# Altium footprint library WR-BHD.PcbLib: 220 footprints (part 12 of 14)
Each footprint in its own frame and in the unit in brackets; x right, y up, seen from the top. Pads: shape width x height; smd on the part's side, far side on the other; paste and mask are expansions set on the pad; w line width, h text height; cw(c..) or ccw(c..) is an arc to the next point about the centre after c.
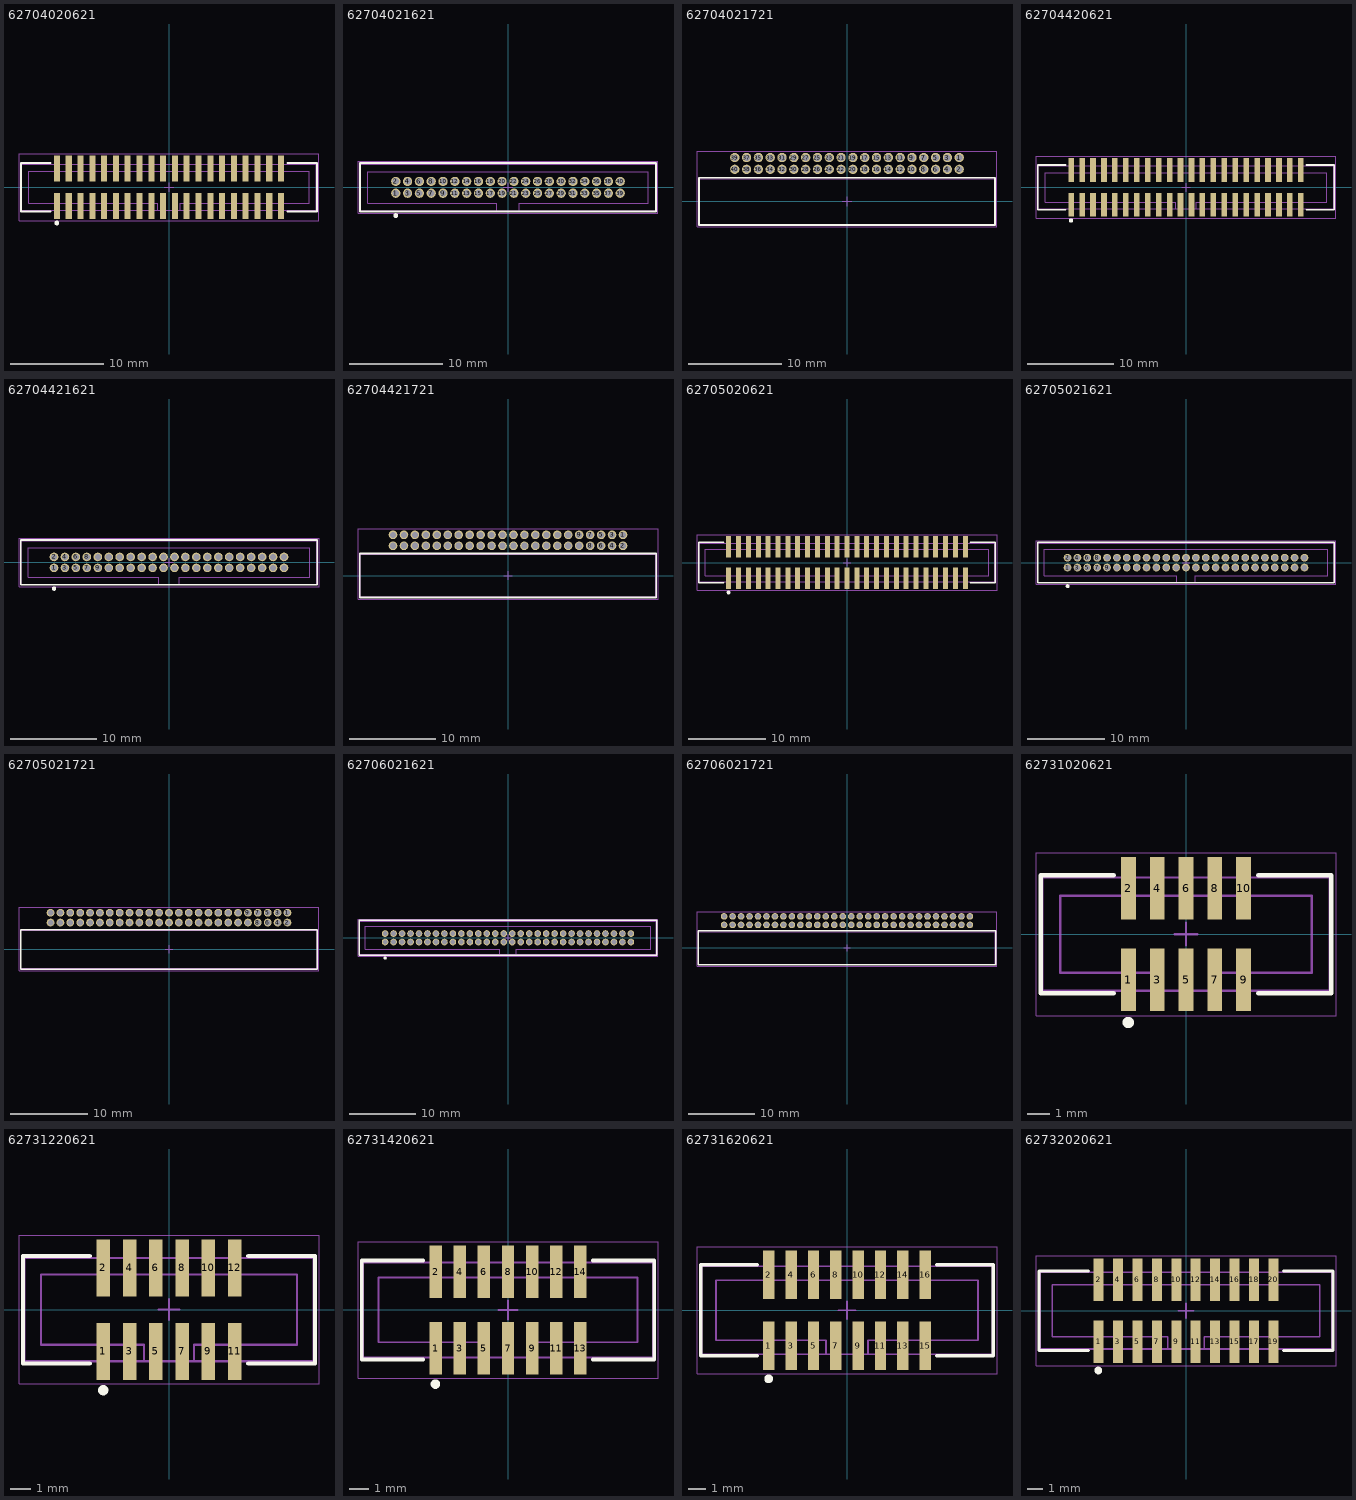
[diagram p11: the footprints below, top view; thin cyan lines are the x and y axes]

## 62704020621 [mm] "Boc Header SMT type, 40p"
height 5.3
pads (40):
  rect 0.65x2.76 smd: 1(-12.065,-2.02) 2(-12.065,2.02) 3(-10.795,-2.02) 4(-10.795,2.02) 5(-9.525,-2.02) 6(-9.525,2.02) 7(-8.255,-2.02) 8(-8.255,2.02) 9(-6.985,-2.02) 10(-6.985,2.02) 11(-5.715,-2.02) 12(-5.715,2.02) 13(-4.445,-2.02) 14(-4.445,2.02) 15(-3.175,-2.02) 16(-3.175,2.02) 17(-1.905,-2.02) 18(-1.905,2.02) 19(-0.635,-2.02) 20(-0.635,2.02) 21(0.635,-2.02) 22(0.635,2.02) 23(1.905,-2.02) 24(1.905,2.02) 25(3.175,-2.02) 26(3.175,2.02) 27(4.445,-2.02) 28(4.445,2.02) 29(5.715,-2.02) 30(5.715,2.02) 31(6.985,-2.02) 32(6.985,2.02) 33(8.255,-2.02) 34(8.255,2.02) 35(9.525,-2.02) 36(9.525,2.02) 37(10.795,-2.02) 38(10.795,2.02) 39(12.065,-2.02) 40(12.065,2.02)
Top Overlay:
  circle w0.25: c-12.075,-3.85 r0.125
  lines w0.2: -12.725,-2.6 -15.95,-2.6 -15.95,2.6 -12.725,2.6 ; 12.725,-2.6 15.95,-2.6 15.95,2.6 12.725,2.6
Top Assembly:
  lines w0.1: -1.2,-2.5 -1.2,-1.7 -15.075,-1.7 -15.075,1.7 15.075,1.7 15.075,-1.7 1.2,-1.7 1.2,-2.5 ; -15.875,-2.5 15.875,-2.5 15.875,2.5 -15.875,2.5 -15.875,-2.5
Top Designator:
  text ".Designator" at -3.647,-0.357 h1
Top 3D Body:
  lines w0.1: -1.2,-2.5 -1.2,-1.7 -15.075,-1.7 -15.075,1.7 15.075,1.7 15.075,-1.7 1.2,-1.7 1.2,-2.5 ; -15.875,-2.5 -15.875,2.5 15.875,2.5 15.875,-2.5 -15.875,-2.5
Top Courtyard:
  lines w0.05: -16.15,-3.6 16.15,-3.6 16.15,3.6 -16.15,3.6 -16.15,-3.6
Top Component Center:
  lines w0.1: -0.5,0 0.5,0 ; 0,-0.5 0,0.5
3D body "62704020621.stp": height 5.2, standoff 0, extent -15.875,-2.8 15.875,2.8

## 62704021621 [mm] "1.27x1.27mm Pitch Box Header Straight Type, 40p"
height 4.9
pads (40):
  round 1 hole 0.7: 1(-12.065,-0.635) 2(-12.065,0.635) 3(-10.795,-0.635) 4(-10.795,0.635) 5(-9.525,-0.635) 6(-9.525,0.635) 7(-8.255,-0.635) 8(-8.255,0.635) 9(-6.985,-0.635) 10(-6.985,0.635) 11(-5.715,-0.635) 12(-5.715,0.635) 13(-4.445,-0.635) 14(-4.445,0.635) 15(-3.175,-0.635) 16(-3.175,0.635) 17(-1.905,-0.635) 18(-1.905,0.635) 19(-0.635,-0.635) 20(-0.635,0.635) 21(0.635,-0.635) 22(0.635,0.635) 23(1.905,-0.635) 24(1.905,0.635) 25(3.175,-0.635) 26(3.175,0.635) 27(4.445,-0.635) 28(4.445,0.635) 29(5.715,-0.635) 30(5.715,0.635) 31(6.985,-0.635) 32(6.985,0.635) 33(8.255,-0.635) 34(8.255,0.635) 35(9.525,-0.635) 36(9.525,0.635) 37(10.795,-0.635) 38(10.795,0.635) 39(12.065,-0.635) 40(12.065,0.635)
Top Overlay:
  circle w0.25: c-12.065,-3.035 r0.125
  lines w0.2: -15.925,-2.6 15.925,-2.6 15.925,2.6 -15.925,2.6 -15.925,-2.6
Top Assembly:
  lines w0.1: -1.2,-2.499 -1.2,-1.699 ; -1.2,-1.7 -15.075,-1.7 -15.075,1.7 15.075,1.7 15.075,-1.7 1.2,-1.7 ; 1.2,-2.499 1.2,-1.699 ; -15.875,-2.5 15.875,-2.5 15.875,2.5 -15.875,2.5 -15.875,-2.5
Top Designator:
  text ".Designator" at -3.647,-0.357 h1
Top 3D Body:
  lines w0.1: -1.2,-2.499 -1.2,-1.699 ; -1.2,-1.7 -15.075,-1.7 -15.075,1.7 15.075,1.7 15.075,-1.7 1.2,-1.7 ; 1.2,-2.499 1.2,-1.699 ; -15.875,-2.5 -15.875,2.5 15.875,2.5 15.875,-2.5 -15.875,-2.5
Top Courtyard:
  lines w0.05: -16.125,-2.8 16.125,-2.8 16.125,2.8 -16.125,2.8 -16.125,-2.8
Top Component Center:
  lines w0.1: -0.5,0 0.5,0 ; 0,-0.5 0,0.5
3D body "62704021621.stp": height 4.93, standoff -2.37, extent -15.875,-2.55 15.875,2.5

## 62704021721 [mm] "1.27x1.27mm Pitch Box Header Right Angle Type, 40p"
height 5
pads (40):
  round 1 hole 0.7: 1(12.065,4.72) 2(12.065,3.45) 3(10.795,4.72) 4(10.795,3.45) 5(9.525,4.72) 6(9.525,3.45) 7(8.255,4.72) 8(8.255,3.45) 9(6.985,4.72) 10(6.985,3.45) 11(5.715,4.72) 12(5.715,3.45) 13(4.445,4.72) 14(4.445,3.45) 15(3.175,4.72) 16(3.175,3.45) 17(1.905,4.72) 18(1.905,3.45) 19(0.635,4.72) 20(0.635,3.45) 21(-0.635,4.72) 22(-0.635,3.45) 23(-1.905,4.72) 24(-1.905,3.45) 25(-3.175,4.72) 26(-3.175,3.45) 27(-4.445,4.72) 28(-4.445,3.45) 29(-5.715,4.72) 30(-5.715,3.45) 31(-6.985,4.72) 32(-6.985,3.45) 33(-8.255,4.72) 34(-8.255,3.45) 35(-9.525,4.72) 36(-9.525,3.45) 37(-10.795,4.72) 38(-10.795,3.45) 39(-12.065,4.72) 40(-12.065,3.45)
Top Overlay:
  lines w0.2: -15.925,-2.55 15.925,-2.55 15.925,2.55 -15.925,2.55 -15.925,-2.55
Top Assembly:
  lines w0.1: -15.875,-2.45 -15.875,2.45 15.875,2.45 15.875,-2.45 -15.875,-2.45
Top Designator:
  text ".Designator" at -3.647,-0.357 h1
Top 3D Body:
  lines w0.1: -15.875,-2.45 15.875,-2.45 15.875,2.45 -15.875,2.45 -15.875,-2.45
Top Courtyard:
  lines w0.05: -16.125,-2.75 16.125,-2.75 16.125,5.42 -16.125,5.42 -16.125,-2.75
Top Component Center:
  lines w0.1: -0.5,0 0.5,0 ; 0,-0.5 0,0.5
3D body "62704021721.stp": height 5.08, standoff -2.37, extent -15.875,-2.45 15.875,4.92

## 62704420621 [mm] "Boc Header SMT type, 44p"
height 5.3
pads (44):
  rect 0.65x2.76 smd: 1(-13.335,-2.02) 2(-13.335,2.02) 3(-12.065,-2.02) 4(-12.065,2.02) 5(-10.795,-2.02) 6(-10.795,2.02) 7(-9.525,-2.02) 8(-9.525,2.02) 9(-8.255,-2.02) 10(-8.255,2.02) 11(-6.985,-2.02) 12(-6.985,2.02) 13(-5.715,-2.02) 14(-5.715,2.02) 15(-4.445,-2.02) 16(-4.445,2.02) 17(-3.175,-2.02) 18(-3.175,2.02) 19(-1.905,-2.02) 20(-1.905,2.02) 21(-0.635,-2.02) 22(-0.635,2.02) 23(0.635,-2.02) 24(0.635,2.02) 25(1.905,-2.02) 26(1.905,2.02) 27(3.175,-2.02) 28(3.175,2.02) 29(4.445,-2.02) 30(4.445,2.02) 31(5.715,-2.02) 32(5.715,2.02) 33(6.985,-2.02) 34(6.985,2.02) 35(8.255,-2.02) 36(8.255,2.02) 37(9.525,-2.02) 38(9.525,2.02) 39(10.795,-2.02) 40(10.795,2.02) 41(12.065,-2.02) 42(12.065,2.02) 43(13.335,-2.02) 44(13.335,2.02)
Top Overlay:
  circle w0.25: c-13.345,-3.85 r0.125
  lines w0.2: -13.995,-2.6 -17.22,-2.6 -17.22,2.6 -13.995,2.6 ; 13.995,-2.6 17.22,-2.6 17.22,2.6 13.995,2.6
Top Assembly:
  lines w0.1: -1.2,-2.5 -1.2,-1.7 -16.345,-1.7 -16.345,1.7 16.345,1.7 16.345,-1.7 1.2,-1.7 1.2,-2.5 ; -17.145,-2.5 -17.145,2.5 17.145,2.5 17.145,-2.5 -17.145,-2.5
Top Designator:
  text ".Designator" at -3.647,-0.357 h1
Top 3D Body:
  lines w0.1: -1.2,-2.5 -1.2,-1.7 -16.345,-1.7 -16.345,1.7 16.345,1.7 16.345,-1.7 1.2,-1.7 1.2,-2.5 ; -17.145,-2.5 17.145,-2.5 17.145,2.5 -17.145,2.5 -17.145,-2.5
Top Courtyard:
  lines w0.05: -17.42,-3.6 -17.42,3.6 17.42,3.6 17.42,-3.6 -17.42,-3.6
Top Component Center:
  lines w0.1: -0.5,0 0.5,0 ; 0,-0.5 0,0.5
3D body "62704420621.stp": height 5.2, standoff 0, extent -17.145,-2.8 17.145,2.8

## 62704421621 [mm] "1.27x1.27mm Pitch Box Header Straight Type, 44p"
height 4.9
pads (44):
  round 1 hole 0.7: 1(-13.335,-0.635) 2(-13.335,0.635) 3(-12.065,-0.635) 4(-12.065,0.635) 5(-10.795,-0.635) 6(-10.795,0.635) 7(-9.525,-0.635) 8(-9.525,0.635) 9(-8.255,-0.635) 10(-8.255,0.635) 11(-6.985,-0.635) 12(-6.985,0.635) 13(-5.715,-0.635) 14(-5.715,0.635) 15(-4.445,-0.635) 16(-4.445,0.635) 17(-3.175,-0.635) 18(-3.175,0.635) 19(-1.905,-0.635) 20(-1.905,0.635) 21(-0.635,-0.635) 22(-0.635,0.635) 23(0.635,-0.635) 24(0.635,0.635) 25(1.905,-0.635) 26(1.905,0.635) 27(3.175,-0.635) 28(3.175,0.635) 29(4.445,-0.635) 30(4.445,0.635) 31(5.715,-0.635) 32(5.715,0.635) 33(6.985,-0.635) 34(6.985,0.635) 35(8.255,-0.635) 36(8.255,0.635) 37(9.525,-0.635) 38(9.525,0.635) 39(10.795,-0.635) 40(10.795,0.635) 41(12.065,-0.635) 42(12.065,0.635) 43(13.335,-0.635) 44(13.335,0.635)
Top Overlay:
  circle w0.25: c-13.335,-3.035 r0.125
  lines w0.2: -17.195,-2.6 17.195,-2.6 17.195,2.6 -17.195,2.6 -17.195,-2.6
Top Assembly:
  lines w0.1: -1.2,-2.499 -1.2,-1.699 ; -1.2,-1.7 -16.345,-1.7 -16.345,1.7 16.345,1.7 16.345,-1.7 1.2,-1.7 ; 1.2,-2.499 1.2,-1.699 ; -17.145,-2.5 17.145,-2.5 17.145,2.5 -17.145,2.5 -17.145,-2.5
Top Designator:
  text ".Designator" at -3.647,-0.357 h1
Top 3D Body:
  lines w0.1: -1.2,-2.499 -1.2,-1.699 ; -1.2,-1.7 -16.345,-1.7 -16.345,1.7 16.345,1.7 16.345,-1.7 1.2,-1.7 ; 1.2,-2.499 1.2,-1.699 ; -17.145,-2.5 -17.145,2.5 17.145,2.5 17.145,-2.5 -17.145,-2.5
Top Courtyard:
  lines w0.05: -17.395,-2.8 17.395,-2.8 17.395,2.8 -17.395,2.8 -17.395,-2.8
Top Component Center:
  lines w0.1: -0.5,0 0.5,0 ; 0,-0.5 0,0.5
3D body "62704421621.stp": height 4.93, standoff -2.37, extent -17.145,-2.55 17.145,2.5

## 62704421721 [mm] "1.27x1.27mm Pitch Box Header Right Angle Type, 44p"
height 5
pads (44):
  round 1 hole 0.7: 1(13.335,4.72) 2(13.335,3.45) 3(12.065,4.72) 4(12.065,3.45) 5(10.795,4.72) 6(10.795,3.45) 7(9.525,4.72) 8(9.525,3.45) 9(8.255,4.72) 10(8.255,3.45) 11(6.985,4.72) 12(6.985,3.45) 13(5.715,4.72) 14(5.715,3.45) 15(4.445,4.72) 16(4.445,3.45) 17(3.175,4.72) 18(3.175,3.45) 19(1.905,4.72) 20(1.905,3.45) 21(0.635,4.72) 22(0.635,3.45) 23(-0.635,4.72) 24(-0.635,3.45) 25(-1.905,4.72) 26(-1.905,3.45) 27(-3.175,4.72) 28(-3.175,3.45) 29(-4.445,4.72) 30(-4.445,3.45) 31(-5.715,4.72) 32(-5.715,3.45) 33(-6.985,4.72) 34(-6.985,3.45) 35(-8.255,4.72) 36(-8.255,3.45) 37(-9.525,4.72) 38(-9.525,3.45) 39(-10.795,4.72) 40(-10.795,3.45) 41(-12.065,4.72) 42(-12.065,3.45) 43(-13.335,4.72) 44(-13.335,3.45)
Top Overlay:
  lines w0.2: -17.195,-2.55 -17.195,2.55 17.195,2.55 17.195,-2.55 -17.195,-2.55
Top Assembly:
  lines w0.1: -17.145,-2.45 17.145,-2.45 17.145,2.45 -17.145,2.45 -17.145,-2.45
Top Designator:
  text ".Designator" at -3.647,-0.357 h1
Top 3D Body:
  lines w0.1: -17.145,-2.45 -17.145,2.45 17.145,2.45 17.145,-2.45 -17.145,-2.45
Top Courtyard:
  lines w0.05: -17.395,-2.75 -17.395,5.42 17.395,5.42 17.395,-2.75 -17.395,-2.75
Top Component Center:
  lines w0.1: -0.5,0 0.5,0 ; 0,-0.5 0,0.5
3D body "62704421721.stp": height 5.08, standoff -2.37, extent -17.145,-2.45 17.145,4.92

## 62705020621 [mm] "Boc Header SMT type, 50p"
height 5.3
pads (50):
  rect 0.65x2.76 smd: 1(-15.24,-2.02) 2(-15.24,2.02) 3(-13.97,-2.02) 4(-13.97,2.02) 5(-12.7,-2.02) 6(-12.7,2.02) 7(-11.43,-2.02) 8(-11.43,2.02) 9(-10.16,-2.02) 10(-10.16,2.02) 11(-8.89,-2.02) 12(-8.89,2.02) 13(-7.62,-2.02) 14(-7.62,2.02) 15(-6.35,-2.02) 16(-6.35,2.02) 17(-5.08,-2.02) 18(-5.08,2.02) 19(-3.81,-2.02) 20(-3.81,2.02) 21(-2.54,-2.02) 22(-2.54,2.02) 23(-1.27,-2.02) 24(-1.27,2.02) 25(0,-2.02) 26(0,2.02) 27(1.27,-2.02) 28(1.27,2.02) 29(2.54,-2.02) 30(2.54,2.02) 31(3.81,-2.02) 32(3.81,2.02) 33(5.08,-2.02) 34(5.08,2.02) 35(6.35,-2.02) 36(6.35,2.02) 37(7.62,-2.02) 38(7.62,2.02) 39(8.89,-2.02) 40(8.89,2.02) 41(10.16,-2.02) 42(10.16,2.02) 43(11.43,-2.02) 44(11.43,2.02) 45(12.7,-2.02) 46(12.7,2.02) 47(13.97,-2.02) 48(13.97,2.02) 49(15.24,-2.02) 50(15.24,2.02)
Top Overlay:
  circle w0.25: c-15.25,-3.85 r0.125
  lines w0.2: -15.9,-2.6 -19.125,-2.6 -19.125,2.6 -15.9,2.6 ; 15.9,-2.6 19.125,-2.6 19.125,2.6 15.9,2.6
Top Assembly:
  lines w0.1: -1.2,-2.5 -1.2,-1.7 -18.25,-1.7 -18.25,1.7 18.25,1.7 18.25,-1.7 1.2,-1.7 1.2,-2.5 ; -19.05,-2.5 -19.05,2.5 19.05,2.5 19.05,-2.5 -19.05,-2.5
Top Designator:
  text ".Designator" at -3.647,-0.357 h1
Top 3D Body:
  lines w0.1: -1.2,-2.5 -1.2,-1.7 -18.25,-1.7 -18.25,1.7 18.25,1.7 18.25,-1.7 1.2,-1.7 1.2,-2.5 ; -19.05,-2.5 19.05,-2.5 19.05,2.5 -19.05,2.5 -19.05,-2.5
Top Courtyard:
  lines w0.05: -19.325,-3.6 -19.325,3.6 19.325,3.6 19.325,-3.6 -19.325,-3.6
Top Component Center:
  lines w0.1: -0.5,0 0.5,0 ; 0,-0.5 0,0.5
3D body "62705020621.stp": height 5.2, standoff 0, extent -19.05,-2.8 19.05,2.8

## 62705021621 [mm] "1.27x1.27mm Pitch Box Header Straight Type, 50p"
height 4.9
pads (50):
  round 1 hole 0.7: 1(-15.24,-0.635) 2(-15.24,0.635) 3(-13.97,-0.635) 4(-13.97,0.635) 5(-12.7,-0.635) 6(-12.7,0.635) 7(-11.43,-0.635) 8(-11.43,0.635) 9(-10.16,-0.635) 10(-10.16,0.635) 11(-8.89,-0.635) 12(-8.89,0.635) 13(-7.62,-0.635) 14(-7.62,0.635) 15(-6.35,-0.635) 16(-6.35,0.635) 17(-5.08,-0.635) 18(-5.08,0.635) 19(-3.81,-0.635) 20(-3.81,0.635) 21(-2.54,-0.635) 22(-2.54,0.635) 23(-1.27,-0.635) 24(-1.27,0.635) 25(0,-0.635) 26(0,0.635) 27(1.27,-0.635) 28(1.27,0.635) 29(2.54,-0.635) 30(2.54,0.635) 31(3.81,-0.635) 32(3.81,0.635) 33(5.08,-0.635) 34(5.08,0.635) 35(6.35,-0.635) 36(6.35,0.635) 37(7.62,-0.635) 38(7.62,0.635) 39(8.89,-0.635) 40(8.89,0.635) 41(10.16,-0.635) 42(10.16,0.635) 43(11.43,-0.635) 44(11.43,0.635) 45(12.7,-0.635) 46(12.7,0.635) 47(13.97,-0.635) 48(13.97,0.635) 49(15.24,-0.635) 50(15.24,0.635)
Top Overlay:
  circle w0.25: c-15.24,-3.035 r0.125
  lines w0.2: -19.1,-2.6 19.1,-2.6 19.1,2.6 -19.1,2.6 -19.1,-2.6
Top Assembly:
  lines w0.1: -1.2,-2.499 -1.2,-1.699 ; -1.2,-1.7 -18.25,-1.7 -18.25,1.7 18.25,1.7 18.25,-1.7 1.2,-1.7 ; 1.2,-2.499 1.2,-1.699 ; -19.05,-2.5 19.05,-2.5 19.05,2.5 -19.05,2.5 -19.05,-2.5
Top Designator:
  text ".Designator" at -3.647,-0.357 h1
Top 3D Body:
  lines w0.1: -1.2,-2.499 -1.2,-1.699 ; -1.2,-1.7 -18.25,-1.7 -18.25,1.7 18.25,1.7 18.25,-1.7 1.2,-1.7 ; 1.2,-2.499 1.2,-1.699 ; -19.05,-2.5 -19.05,2.5 19.05,2.5 19.05,-2.5 -19.05,-2.5
Top Courtyard:
  lines w0.05: -19.3,-2.8 19.3,-2.8 19.3,2.8 -19.3,2.8 -19.3,-2.8
Top Component Center:
  lines w0.1: -0.5,0 0.5,0 ; 0,-0.5 0,0.5
3D body "62705021621.stp": height 4.93, standoff -2.37, extent -19.05,-2.55 19.05,2.5

## 62705021721 [mm] "1.27x1.27mm Pitch Box Header Right Angle Type, 50p"
height 5
pads (50):
  round 1 hole 0.7: 1(15.24,4.72) 2(15.24,3.45) 3(13.97,4.72) 4(13.97,3.45) 5(12.7,4.72) 6(12.7,3.45) 7(11.43,4.72) 8(11.43,3.45) 9(10.16,4.72) 10(10.16,3.45) 11(8.89,4.72) 12(8.89,3.45) 13(7.62,4.72) 14(7.62,3.45) 15(6.35,4.72) 16(6.35,3.45) 17(5.08,4.72) 18(5.08,3.45) 19(3.81,4.72) 20(3.81,3.45) 21(2.54,4.72) 22(2.54,3.45) 23(1.27,4.72) 24(1.27,3.45) 25(0,4.72) 26(0,3.45) 27(-1.27,4.72) 28(-1.27,3.45) 29(-2.54,4.72) 30(-2.54,3.45) 31(-3.81,4.72) 32(-3.81,3.45) 33(-5.08,4.72) 34(-5.08,3.45) 35(-6.35,4.72) 36(-6.35,3.45) 37(-7.62,4.72) 38(-7.62,3.45) 39(-8.89,4.72) 40(-8.89,3.45) 41(-10.16,4.72) 42(-10.16,3.45) 43(-11.43,4.72) 44(-11.43,3.45) 45(-12.7,4.72) 46(-12.7,3.45) 47(-13.97,4.72) 48(-13.97,3.45) 49(-15.24,4.72) 50(-15.24,3.45)
Top Overlay:
  lines w0.2: -19.1,-2.55 19.1,-2.55 19.1,2.55 -19.1,2.55 -19.1,-2.55
Top Assembly:
  lines w0.1: -19.05,-2.45 -19.05,2.45 19.05,2.45 19.05,-2.45 -19.05,-2.45
Top Designator:
  text ".Designator" at -3.647,-0.357 h1
Top 3D Body:
  lines w0.1: -19.05,-2.45 19.05,-2.45 19.05,2.45 -19.05,2.45 -19.05,-2.45
Top Courtyard:
  lines w0.05: -19.3,-2.75 19.3,-2.75 19.3,5.42 -19.3,5.42 -19.3,-2.75
Top Component Center:
  lines w0.1: -0.5,0 0.5,0 ; 0,-0.5 0,0.5
3D body "62705021721.stp": height 5.08, standoff -2.37, extent -19.05,-2.45 19.05,4.92

## 62706021621 [mm] "1.27x1.27mm Pitch Box Header Straight Type, 60p"
height 4.9
pads (60):
  round 1 hole 0.7: 1(-18.415,-0.635) 2(-18.415,0.635) 3(-17.145,-0.635) 4(-17.145,0.635) 5(-15.875,-0.635) 6(-15.875,0.635) 7(-14.605,-0.635) 8(-14.605,0.635) 9(-13.335,-0.635) 10(-13.335,0.635) 11(-12.065,-0.635) 12(-12.065,0.635) 13(-10.795,-0.635) 14(-10.795,0.635) 15(-9.525,-0.635) 16(-9.525,0.635) 17(-8.255,-0.635) 18(-8.255,0.635) 19(-6.985,-0.635) 20(-6.985,0.635) 21(-5.715,-0.635) 22(-5.715,0.635) 23(-4.445,-0.635) 24(-4.445,0.635) 25(-3.175,-0.635) 26(-3.175,0.635) 27(-1.905,-0.635) 28(-1.905,0.635) 29(-0.635,-0.635) 30(-0.635,0.635) 31(0.635,-0.635) 32(0.635,0.635) 33(1.905,-0.635) 34(1.905,0.635) 35(3.175,-0.635) 36(3.175,0.635) 37(4.445,-0.635) 38(4.445,0.635) 39(5.715,-0.635) 40(5.715,0.635) 41(6.985,-0.635) 42(6.985,0.635) 43(8.255,-0.635) 44(8.255,0.635) 45(9.525,-0.635) 46(9.525,0.635) 47(10.795,-0.635) 48(10.795,0.635) 49(12.065,-0.635) 50(12.065,0.635) 51(13.335,-0.635) 52(13.335,0.635) 53(14.605,-0.635) 54(14.605,0.635) 55(15.875,-0.635) 56(15.875,0.635) 57(17.145,-0.635) 58(17.145,0.635) 59(18.415,-0.635) 60(18.415,0.635)
Top Overlay:
  circle w0.25: c-18.415,-3.035 r0.125
  lines w0.2: -22.275,-2.6 -22.275,2.6 22.275,2.6 22.275,-2.6 -22.275,-2.6
Top Assembly:
  lines w0.1: -1.2,-2.499 -1.2,-1.699 ; -1.2,-1.7 -21.425,-1.7 -21.425,1.7 21.425,1.7 21.425,-1.7 1.2,-1.7 ; 1.2,-2.499 1.2,-1.699 ; -22.225,-2.5 -22.225,2.5 22.225,2.5 22.225,-2.5 -22.225,-2.5
Top Designator:
  text ".Designator" at -3.647,-0.357 h1
Top 3D Body:
  lines w0.1: -1.2,-2.524 -1.2,-1.724 ; -1.2,-1.7 -21.425,-1.7 -21.425,1.7 21.425,1.7 21.425,-1.7 1.2,-1.7 ; 1.2,-2.524 1.2,-1.724 ; -22.225,-2.5 22.225,-2.5 22.225,2.5 -22.225,2.5 -22.225,-2.5
Top Courtyard:
  lines w0.05: -22.475,-2.8 -22.475,2.8 22.475,2.8 22.475,-2.8 -22.475,-2.8
Top Component Center:
  lines w0.1: -0.5,0 0.5,0 ; 0,-0.5 0,0.5
3D body "62706021621.stp": height 4.93, standoff -2.37, extent -22.225,-2.525 22.225,2.525

## 62706021721 [mm] "1.27x1.27mm Pitch Box Header Right Angle Type, 60p"
height 5
pads (60):
  round 1 hole 0.7: 1(18.415,4.72) 2(18.415,3.45) 3(17.145,4.72) 4(17.145,3.45) 5(15.875,4.72) 6(15.875,3.45) 7(14.605,4.72) 8(14.605,3.45) 9(13.335,4.72) 10(13.335,3.45) 11(12.065,4.72) 12(12.065,3.45) 13(10.795,4.72) 14(10.795,3.45) 15(9.525,4.72) 16(9.525,3.45) 17(8.255,4.72) 18(8.255,3.45) 19(6.985,4.72) 20(6.985,3.45) 21(5.715,4.72) 22(5.715,3.45) 23(4.445,4.72) 24(4.445,3.45) 25(3.175,4.72) 26(3.175,3.45) 27(1.905,4.72) 28(1.905,3.45) 29(0.635,4.72) 30(0.635,3.45) 31(-0.635,4.72) 32(-0.635,3.45) 33(-1.905,4.72) 34(-1.905,3.45) 35(-3.175,4.72) 36(-3.175,3.45) 37(-4.445,4.72) 38(-4.445,3.45) 39(-5.715,4.72) 40(-5.715,3.45) 41(-6.985,4.72) 42(-6.985,3.45) 43(-8.255,4.72) 44(-8.255,3.45) 45(-9.525,4.72) 46(-9.525,3.45) 47(-10.795,4.72) 48(-10.795,3.45) 49(-12.065,4.72) 50(-12.065,3.45) 51(-13.335,4.72) 52(-13.335,3.45) 53(-14.605,4.72) 54(-14.605,3.45) 55(-15.875,4.72) 56(-15.875,3.45) 57(-17.145,4.72) 58(-17.145,3.45) 59(-18.415,4.72) 60(-18.415,3.45)
Top Overlay:
  lines w0.2: -22.275,-2.55 -22.275,2.55 22.275,2.55 22.275,-2.55 -22.275,-2.55
Top Assembly:
  lines w0.1: -22.225,-2.45 22.225,-2.45 22.225,2.45 -22.225,2.45 -22.225,-2.45
Top Designator:
  text ".Designator" at -3.647,-0.357 h1
Top 3D Body:
  lines w0.1: -22.225,-2.45 -22.225,2.45 22.225,2.45 22.225,-2.45 -22.225,-2.45
Top Courtyard:
  lines w0.05: -22.475,-2.75 -22.475,5.42 22.475,5.42 22.475,-2.75 -22.475,-2.75
Top Component Center:
  lines w0.1: -0.5,0 0.5,0 ; 0,-0.5 0,0.5
3D body "62706021721.stp": height 5.08, standoff -2.37, extent -22.225,-2.45 22.225,4.92

## 62731020621 [mm] "Boc Header SMT type, 10p"
height 5.3
pads (10):
  rect 0.65x2.76 smd: 1(-2.54,-2.02) 2(-2.54,2.02) 3(-1.27,-2.02) 4(-1.27,2.02) 5(0,-2.02) 6(0,2.02) 7(1.27,-2.02) 8(1.27,2.02) 9(2.54,-2.02) 10(2.54,2.02)
Top Overlay:
  circle w0.25: c-2.55,-3.9 r0.125
  lines w0.2: -3.2,-2.6 -6.425,-2.6 -6.425,2.6 -3.2,2.6 ; 3.2,-2.6 6.425,-2.6 6.425,2.6 3.2,2.6
Top Assembly:
  lines w0.1: -1.2,-2.5 -1.2,-1.7 -5.55,-1.7 -5.55,1.7 5.55,1.7 5.55,-1.7 1.2,-1.7 1.2,-2.5 ; -6.35,-2.5 6.35,-2.5 6.35,2.5 -6.35,2.5 -6.35,-2.5
Top Designator:
  text ".Designator" at -3.647,-0.357 h1
Top 3D Body:
  lines w0.1: -1.2,-2.5 -1.2,-1.7 -5.55,-1.7 -5.55,1.7 5.55,1.7 5.55,-1.7 1.2,-1.7 1.2,-2.5 ; -6.35,-2.5 -6.35,2.5 6.35,2.5 6.35,-2.5 -6.35,-2.5
Top Courtyard:
  lines w0.05: -6.625,-3.6 6.625,-3.6 6.625,3.6 -6.625,3.6 -6.625,-3.6
Top Component Center:
  lines w0.1: -0.5,0 0.5,0 ; 0,-0.5 0,0.5
3D body "62731020621.stp": height 5.3, standoff 0, extent -6.35,-2.755 6.35,2.755

## 62731220621 [mm] "Boc Header SMT type, 12p"
height 5.3
pads (12):
  rect 0.65x2.76 smd: 1(-3.175,-2.02) 2(-3.175,2.02) 3(-1.905,-2.02) 4(-1.905,2.02) 5(-0.635,-2.02) 6(-0.635,2.02) 7(0.635,-2.02) 8(0.635,2.02) 9(1.905,-2.02) 10(1.905,2.02) 11(3.175,-2.02) 12(3.175,2.02)
Top Overlay:
  circle w0.25: c-3.185,-3.9 r0.125
  lines w0.2: -3.835,-2.6 -7.06,-2.6 -7.06,2.6 -3.835,2.6 ; 3.835,-2.6 7.06,-2.6 7.06,2.6 3.835,2.6
Top Assembly:
  lines w0.1: -1.2,-2.5 -1.2,-1.7 -6.185,-1.7 -6.185,1.7 6.185,1.7 6.185,-1.7 1.2,-1.7 1.2,-2.5 ; -6.985,-2.5 6.985,-2.5 6.985,2.5 -6.985,2.5 -6.985,-2.5
Top Designator:
  text ".Designator" at -3.647,-0.357 h1
Top 3D Body:
  lines w0.1: -1.2,-2.5 -1.2,-1.7 -6.185,-1.7 -6.185,1.7 6.185,1.7 6.185,-1.7 1.2,-1.7 1.2,-2.5 ; -6.985,-2.5 -6.985,2.5 6.985,2.5 6.985,-2.5 -6.985,-2.5
Top Courtyard:
  lines w0.05: -7.26,-3.6 7.26,-3.6 7.26,3.6 -7.26,3.6 -7.26,-3.6
Top Component Center:
  lines w0.1: -0.5,0 0.5,0 ; 0,-0.5 0,0.5
3D body "62731220621.stp": height 5.3, standoff 0, extent -6.985,-2.755 6.985,2.755

## 62731420621 [mm] "Boc Header SMT type, 14p"
height 5.3
pads (14):
  rect 0.65x2.76 smd: 1(-3.81,-2.02) 2(-3.81,2.02) 3(-2.54,-2.02) 4(-2.54,2.02) 5(-1.27,-2.02) 6(-1.27,2.02) 7(0,-2.02) 8(0,2.02) 9(1.27,-2.02) 10(1.27,2.02) 11(2.54,-2.02) 12(2.54,2.02) 13(3.81,-2.02) 14(3.81,2.02)
Top Overlay:
  circle w0.25: c-3.82,-3.9 r0.125
  lines w0.2: -4.47,-2.6 -7.695,-2.6 -7.695,2.6 -4.47,2.6 ; 4.47,-2.6 7.695,-2.6 7.695,2.6 4.47,2.6
Top Assembly:
  lines w0.1: -1.2,-2.5 -1.2,-1.7 -6.82,-1.7 -6.82,1.7 6.82,1.7 6.82,-1.7 1.2,-1.7 1.2,-2.5 ; -7.62,-2.5 -7.62,2.5 7.62,2.5 7.62,-2.5 -7.62,-2.5
Top Designator:
  text ".Designator" at -3.647,-0.357 h1
Top 3D Body:
  lines w0.1: -1.2,-2.5 -1.2,-1.7 -6.82,-1.7 -6.82,1.7 6.82,1.7 6.82,-1.7 1.2,-1.7 1.2,-2.5 ; -7.62,-2.5 7.62,-2.5 7.62,2.5 -7.62,2.5 -7.62,-2.5
Top Courtyard:
  lines w0.05: -7.895,-3.6 -7.895,3.6 7.895,3.6 7.895,-3.6 -7.895,-3.6
Top Component Center:
  lines w0.1: -0.5,0 0.5,0 ; 0,-0.5 0,0.5
3D body "62731420621.stp": height 5.3, standoff 0, extent -7.62,-2.755 7.62,2.755

## 62731620621 [mm] "Boc Header SMT type, 16p"
height 5.3
pads (16):
  rect 0.65x2.76 smd: 1(-4.445,-2.02) 2(-4.445,2.02) 3(-3.175,-2.02) 4(-3.175,2.02) 5(-1.905,-2.02) 6(-1.905,2.02) 7(-0.635,-2.02) 8(-0.635,2.02) 9(0.635,-2.02) 10(0.635,2.02) 11(1.905,-2.02) 12(1.905,2.02) 13(3.175,-2.02) 14(3.175,2.02) 15(4.445,-2.02) 16(4.445,2.02)
Top Overlay:
  circle w0.25: c-4.455,-3.9 r0.125
  lines w0.2: -5.105,-2.6 -8.33,-2.6 -8.33,2.6 -5.105,2.6 ; 5.105,-2.6 8.33,-2.6 8.33,2.6 5.105,2.6
Top Assembly:
  lines w0.1: -1.2,-2.5 -1.2,-1.7 -7.455,-1.7 -7.455,1.7 7.455,1.7 7.455,-1.7 1.2,-1.7 1.2,-2.5 ; -8.255,-2.5 8.255,-2.5 8.255,2.5 -8.255,2.5 -8.255,-2.5
Top Designator:
  text ".Designator" at -3.647,-0.357 h1
Top 3D Body:
  lines w0.1: -1.2,-2.5 -1.2,-1.7 -7.455,-1.7 -7.455,1.7 7.455,1.7 7.455,-1.7 1.2,-1.7 1.2,-2.5 ; -8.255,-2.5 -8.255,2.5 8.255,2.5 8.255,-2.5 -8.255,-2.5
Top Courtyard:
  lines w0.05: -8.53,-3.6 8.53,-3.6 8.53,3.6 -8.53,3.6 -8.53,-3.6
Top Component Center:
  lines w0.1: -0.5,0 0.5,0 ; 0,-0.5 0,0.5
3D body "62731620621.stp": height 5.3, standoff 0, extent -8.255,-2.755 8.255,2.755

## 62732020621 [mm] "Boc Header SMT type, 20p"
height 5.3
pads (20):
  rect 0.65x2.76 smd: 1(-5.715,-2.02) 2(-5.715,2.02) 3(-4.445,-2.02) 4(-4.445,2.02) 5(-3.175,-2.02) 6(-3.175,2.02) 7(-1.905,-2.02) 8(-1.905,2.02) 9(-0.635,-2.02) 10(-0.635,2.02) 11(0.635,-2.02) 12(0.635,2.02) 13(1.905,-2.02) 14(1.905,2.02) 15(3.175,-2.02) 16(3.175,2.02) 17(4.445,-2.02) 18(4.445,2.02) 19(5.715,-2.02) 20(5.715,2.02)
Top Overlay:
  circle w0.25: c-5.725,-3.9 r0.125
  lines w0.2: -6.375,-2.6 -9.6,-2.6 -9.6,2.6 -6.375,2.6 ; 6.375,-2.6 9.6,-2.6 9.6,2.6 6.375,2.6
Top Assembly:
  lines w0.1: -1.2,-2.5 -1.2,-1.7 -8.725,-1.7 -8.725,1.7 8.725,1.7 8.725,-1.7 1.2,-1.7 1.2,-2.5 ; -9.525,-2.5 9.525,-2.5 9.525,2.5 -9.525,2.5 -9.525,-2.5
Top Designator:
  text ".Designator" at -3.647,-0.357 h1
Top 3D Body:
  lines w0.1: -1.2,-2.5 -1.2,-1.7 -8.725,-1.7 -8.725,1.7 8.725,1.7 8.725,-1.7 1.2,-1.7 1.2,-2.5 ; -9.525,-2.5 -9.525,2.5 9.525,2.5 9.525,-2.5 -9.525,-2.5
Top Courtyard:
  lines w0.05: -9.8,-3.6 9.8,-3.6 9.8,3.6 -9.8,3.6 -9.8,-3.6
Top Component Center:
  lines w0.1: -0.5,0 0.5,0 ; 0,-0.5 0,0.5
3D body "62732020621.stp": height 5.3, standoff 0, extent -9.525,-2.755 9.525,2.755